# Altium schematic symbol library Schlib1.SchLib: 6 symbols
Pins are listed as number, name and electrical type; pins without a type are passive.

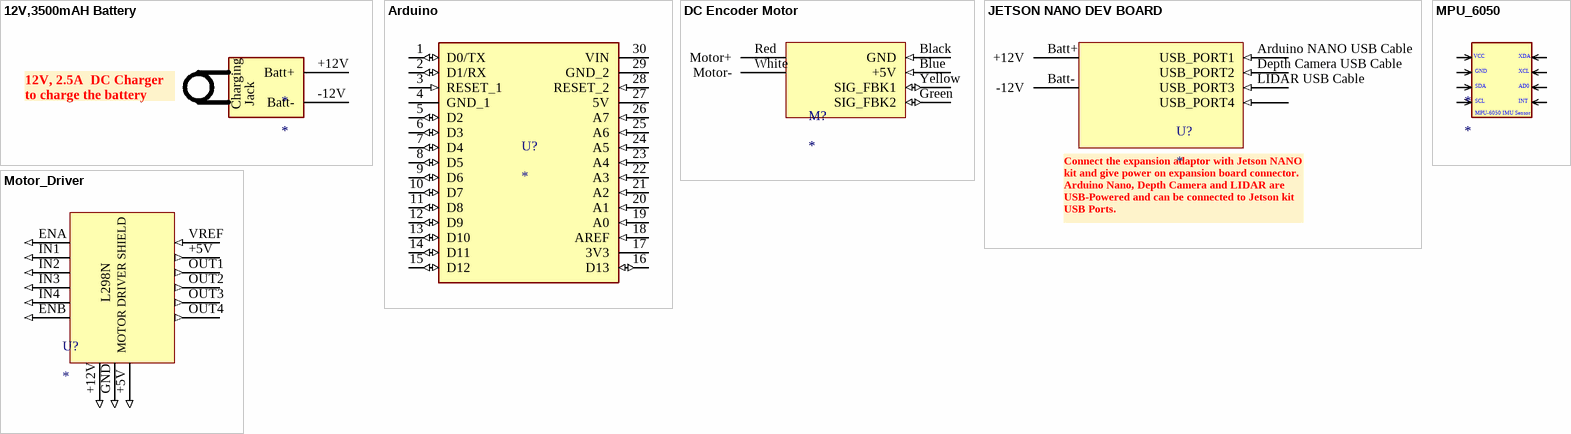
[diagram p0: symbols 12V,3500mAH Battery to MPU_6050]

## 12V,3500mAH Battery
designator *
pins: +12V Batt+ (power), -12V Batt- (power)
text: 12V, 2.5A  DC Charger to charge the battery; Charging; Jack

## Arduino
designator U?
Small, complete, and breadboard-friendly board based on the ATmega328 (Arduino Nano 3.x).; MP: A000005; Check_prices: https://www.snapeda.com/parts/A000005/Arduino/view-part/?ref=eda; Value: *; Availability: In Stock; Price: None; Package: Non-Standard Arduino; SnapEDA_Link: https://www.snapeda.com/parts/A000005/Arduino/view-part/?ref=snap; Purchase-URL: https://pricing.snapeda.com/search/part/A000005/?ref=eda; MF: Arduino
footprint MODULE_A000005
pins: 1 D0/TX (io), 2 D1/RX (io), 3 RESET_1 (in), 4 GND_1 (power), 5 D2 (io), 6 D3 (io), 7 D4 (io), 8 D5 (io), 9 D6 (io), 10 D7 (io), 11 D8 (io), 12 D9 (io), 13 D10 (io), 14 D11 (io), 15 D12 (io), 16 D13 (io), 17 3V3 (power), 18 AREF (in), 19 A0 (in), 20 A1 (in), 21 A2 (in), 22 A3 (in), 23 A4 (in), 24 A5 (in), 25 A6 (in), 26 A7 (in), 27 5V (power), 28 RESET_2 (in), 29 GND_2 (power), 30 VIN (power)

## DC Encoder Motor
designator M?
pins: Black GND (in), Blue +5V (in), Green SIG_FBK2 (io), Red Motor+ (power), White Motor- (power), Yellow SIG_FBK1 (io)

## JETSON NANO DEV BOARD
designator U?
pins: ?1 USB_PORT4 (in), Arduino NANO USB Cable USB_PORT1 (in), Batt+ +12V, Batt- -12V, Depth Camera USB Cable USB_PORT2 (in), LIDAR USB Cable USB_PORT3 (in)
text: Connect the expansion adaptor with Jetson NANO kit and give power on expansion board connector. / Arduino Nano, Depth Camera and LIDAR are USB-Powered and can be connected to Jetson kit USB Ports.

## Motor_Driver
designator U?
pins: +5V (out), +5V (in), +12V (in), ENA (in), ENB (in), GND (in), IN1 (in), IN2 (in), IN3 (in), IN4 (in), OUT1 (out), OUT2 (out), OUT3 (out), OUT4 (out), VREF (in)
text: L298N; MOTOR DRIVER SHIELD

## MPU_6050
designator *
text: VCC; XDA; GND; XCL; SDA; AD0; SCL; INT; MPU-6050 IMU Sensor